# Altium footprint library Miscellaneous Connectors.PcbLib: 245 footprints (part 10 of 16)
Each footprint in its own frame and in the unit in brackets; x right, y up, seen from the top. Pads: shape width x height; smd on the part's side, far side on the other; paste and mask are expansions set on the pad; w line width, h text height; cw(c..) or ccw(c..) is an arc to the next point about the centre after c.
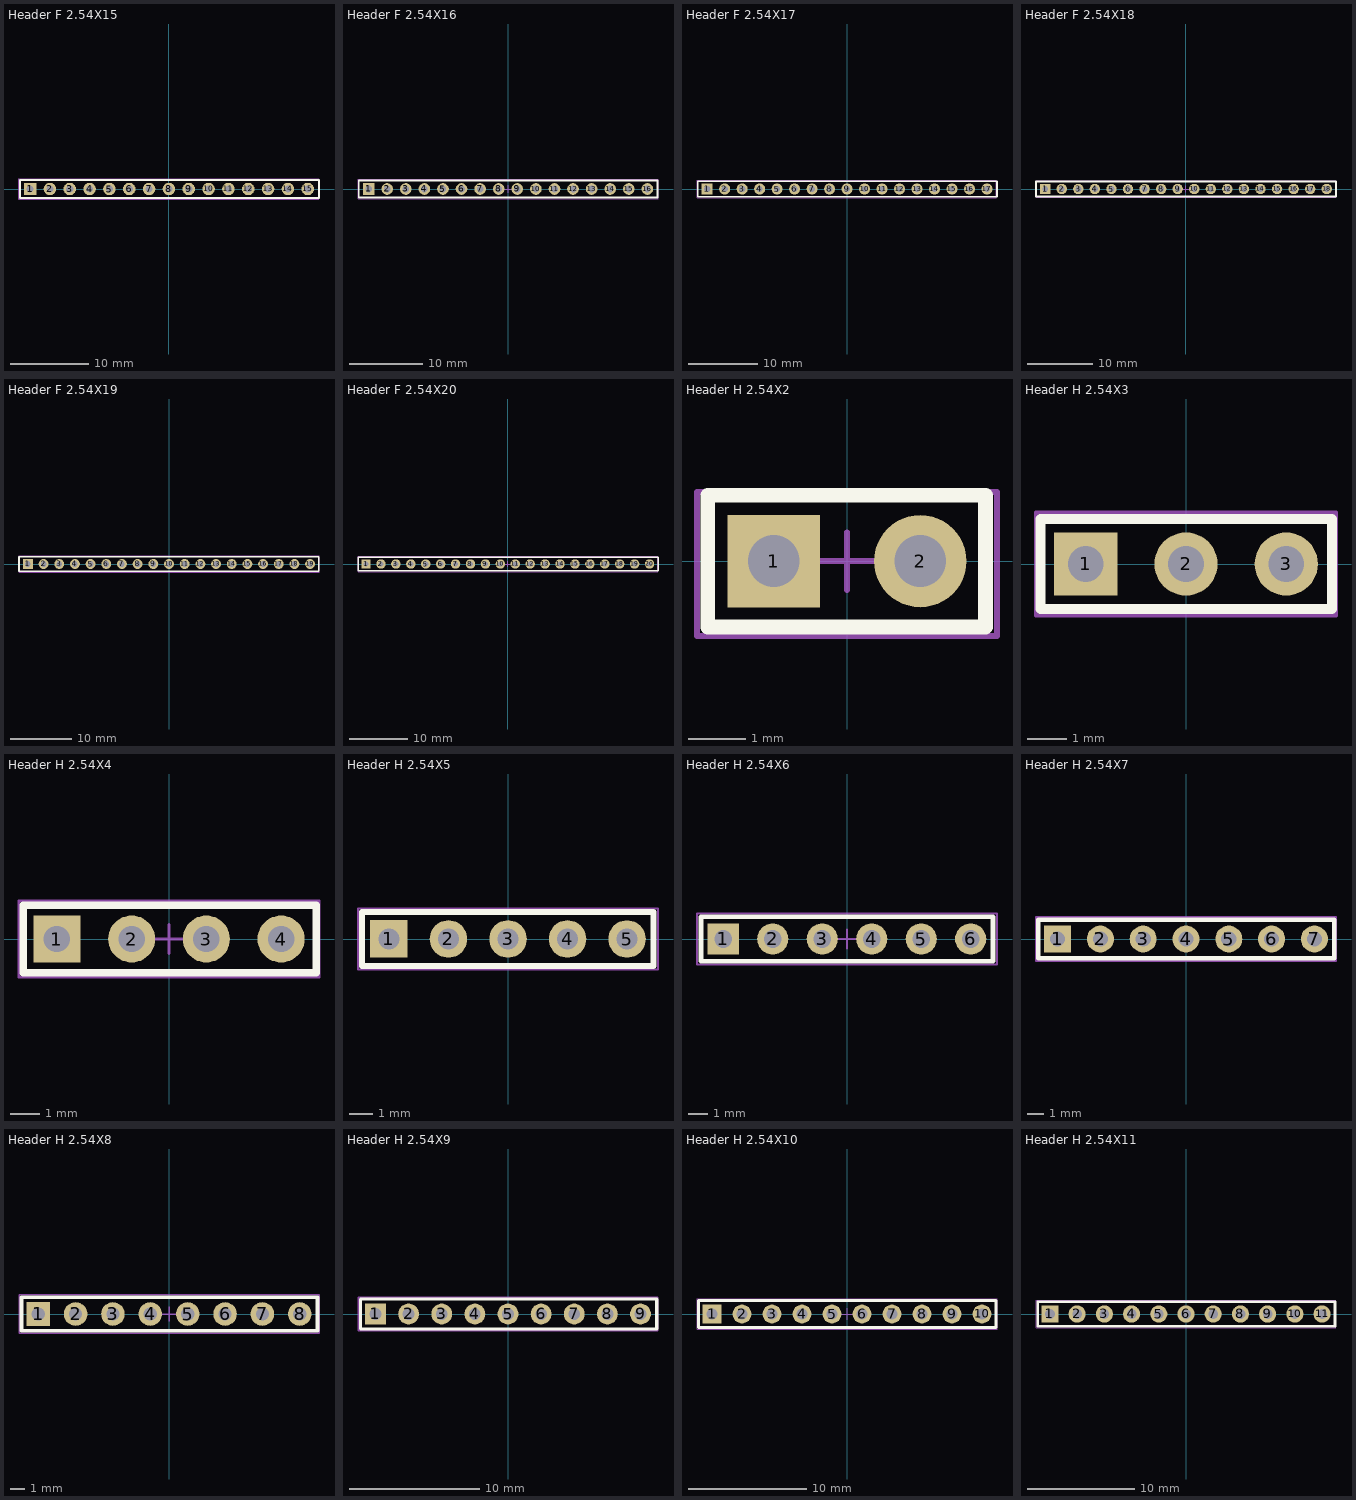
[diagram p9: the footprints below, top view; thin cyan lines are the x and y axes]

## Header F 2.54X15 [mm]
pads (15):
  rect 1.6x1.6 hole 0.9: 1(-17.78,0)
  round 1.6 hole 0.9: 2(-15.24,0) 3(-12.7,0) 4(-10.16,0) 5(-7.62,0) 6(-5.08,0) 7(-2.54,0) 8(0,0) 9(2.54,0) 10(5.08,0) 11(7.62,0) 12(10.16,0) 13(12.7,0) 14(15.24,0) 15(17.78,0)
Top Overlay:
  lines w0.254: -19.1,-1.143 -19.1,1.143 19.22,1.143 19.22,-1.143 -19.1,-1.143
Mechanical 15:
  lines w0.1: -19.2,-1.3 -19.2,1.3 19.2,1.3 19.2,-1.3 -19.2,-1.3
3D body: height 8.6, standoff -3.1, extent -19.175,-1.26 19.175,1.24

## Header F 2.54X16 [mm]
pads (16):
  rect 1.6x1.6 hole 0.9: 1(-19.05,0)
  round 1.6 hole 0.9: 2(-16.51,0) 3(-13.97,0) 4(-11.43,0) 5(-8.89,0) 6(-6.35,0) 7(-3.81,0) 8(-1.27,0) 9(1.27,0) 10(3.81,0) 11(6.35,0) 12(8.89,0) 13(11.43,0) 14(13.97,0) 15(16.51,0) 16(19.05,0)
Top Overlay:
  lines w0.254: -20.4,-1.143 20.45,-1.143 20.45,1.143 -20.4,1.143 -20.4,-1.143
Mechanical 15:
  lines w0.1: -0.5,0 0.5,0 ; 0,-0.5 0,0.5 ; -20.5,-1.3 20.5,-1.3 20.5,1.3 -20.5,1.3 -20.5,-1.3
3D body: height 8.6, standoff -3.1, extent -20.445,-1.25 20.445,1.25

## Header F 2.54X17 [mm]
pads (17):
  rect 1.6x1.6 hole 0.9: 1(-20.32,0)
  round 1.6 hole 0.9: 2(-17.78,0) 3(-15.24,0) 4(-12.7,0) 5(-10.16,0) 6(-7.62,0) 7(-5.08,0) 8(-2.54,0) 9(0,0) 10(2.54,0) 11(5.08,0) 12(7.62,0) 13(10.16,0) 14(12.7,0) 15(15.24,0) 16(17.78,0) 17(20.32,0)
Top Overlay:
  lines w0.254: -21.7,-1.143 -21.7,1.143 21.78,1.143 21.78,-1.143 -21.7,-1.143
Mechanical 15:
  lines w0.1: -21.8,-1.3 -21.8,1.3 21.7,1.3 21.7,-1.3 -21.8,-1.3
3D body: height 8.6, standoff -3.1, extent -21.715,-1.26 21.715,1.24

## Header F 2.54X18 [mm]
pads (18):
  rect 1.6x1.6 hole 0.9: 1(-21.59,0)
  round 1.6 hole 0.9: 2(-19.05,0) 3(-16.51,0) 4(-13.97,0) 5(-11.43,0) 6(-8.89,0) 7(-6.35,0) 8(-3.81,0) 9(-1.27,0) 10(1.27,0) 11(3.81,0) 12(6.35,0) 13(8.89,0) 14(11.43,0) 15(13.97,0) 16(16.51,0) 17(19.05,0) 18(21.59,0)
Top Overlay:
  lines w0.254: -23,-1.143 23.01,-1.143 23.01,1.143 -23,1.143 -23,-1.143
Mechanical 15:
  lines w0.1: -0.5,0 0.5,0 ; 0,-0.5 0,0.5 ; -23,-1.3 23,-1.3 23,1.3 -23,1.3 -23,-1.3
3D body: height 8.6, standoff -3.1, extent -22.98,-1.25 22.99,1.25

## Header F 2.54X19 [mm]
pads (19):
  rect 1.6x1.6 hole 0.9: 1(-22.86,0)
  round 1.6 hole 0.9: 2(-20.32,0) 3(-17.78,0) 4(-15.24,0) 5(-12.7,0) 6(-10.16,0) 7(-7.62,0) 8(-5.08,0) 9(-2.54,0) 10(0,0) 11(2.54,0) 12(5.08,0) 13(7.62,0) 14(10.16,0) 15(12.7,0) 16(15.24,0) 17(17.78,0) 18(20.32,0) 19(22.86,0)
Top Overlay:
  lines w0.254: -24.3,-1.143 -24.3,1.143 24.24,1.143 24.24,-1.143 -24.3,-1.143
Mechanical 15:
  lines w0.1: -24.3,-1.3 -24.3,1.3 24.3,1.3 24.3,-1.3 -24.3,-1.3
3D body: height 8.6, standoff -3.1, extent -24.26,-1.25 24.25,1.25

## Header F 2.54X20 [mm]
pads (20):
  rect 1.6x1.6 hole 0.9: 1(-24.13,0)
  round 1.6 hole 0.9: 2(-21.59,0) 3(-19.05,0) 4(-16.51,0) 5(-13.97,0) 6(-11.43,0) 7(-8.89,0) 8(-6.35,0) 9(-3.81,0) 10(-1.27,0) 11(1.27,0) 12(3.81,0) 13(6.35,0) 14(8.89,0) 15(11.43,0) 16(13.97,0) 17(16.51,0) 18(19.05,0) 19(21.59,0) 20(24.13,0)
Top Overlay:
  lines w0.254: -25.5,-1.143 -25.5,1.143 25.57,1.143 25.57,-1.143 -25.5,-1.143
Mechanical 15:
  lines w0.1: -0.5,0 0.5,0 ; 0,-0.5 0,0.5 ; -25.5,-1.3 -25.5,1.3 25.5,1.3 25.5,-1.3 -25.5,-1.3
3D body: height 8.6, standoff -3.1, extent -25.53,-1.26 25.52,1.24

## Header H 2.54X2 [mm]
pads (2):
  rect 1.6x1.6 hole 0.9: 1(-1.27,0)
  round 1.6 hole 0.9: 2(1.27,0)
Top Overlay:
  lines w0.254: -2.413,-1.143 -2.413,1.143 2.4,1.143 2.4,-1.143 -2.413,-1.143
Mechanical 15:
  lines w0.1: -0.5,0 0.5,0 ; 0,-0.5 0,0.5 ; -2.6,-1.3 -2.6,1.2 2.6,1.2 2.6,-1.3 -2.6,-1.3
3D body: height 4.43, standoff -2.9, extent -2.54,-1.27 2.54,7

## Header H 2.54X3 [mm]
pads (3):
  rect 1.6x1.6 hole 0.9: 1(-2.54,0)
  round 1.6 hole 0.9: 2(0,0) 3(2.54,0)
Top Overlay:
  lines w0.254: -3.683,-1.143 3.7,-1.143 3.7,1.143 -3.683,1.143 -3.683,-1.143
Mechanical 15:
  lines w0.1: -3.8,-1.3 3.8,-1.3 3.8,1.3 -3.8,1.3 -3.8,-1.3
3D body: height 4.43, standoff -2.9, extent -3.81,-1.26 3.81,7.01

## Header H 2.54X4 [mm]
pads (4):
  rect 1.6x1.6 hole 0.9: 1(-3.81,0)
  round 1.6 hole 0.9: 2(-1.27,0) 3(1.27,0) 4(3.81,0)
Top Overlay:
  lines w0.254: -4.953,-1.143 5,-1.143 5,1.143 -4.953,1.143 -4.953,-1.143
Mechanical 15:
  lines w0.1: -0.5,0 0.5,0 ; 0,-0.5 0,0.5 ; -5.1,-1.3 5.1,-1.3 5.1,1.3 -5.1,1.3 -5.1,-1.3
3D body: height 4.43, standoff -2.9, extent -5.08,-1.27 5.08,7

## Header H 2.54X5 [mm]
pads (5):
  rect 1.6x1.6 hole 0.9: 1(-5.08,0)
  round 1.6 hole 0.9: 2(-2.54,0) 3(0,0) 4(2.54,0) 5(5.08,0)
Top Overlay:
  lines w0.254: -6.223,-1.143 6.2,-1.143 6.2,1.143 -6.223,1.143 -6.223,-1.143
Mechanical 15:
  lines w0.1: -6.4,-1.3 6.4,-1.3 6.4,1.3 -6.4,1.3 -6.4,-1.3
3D body: height 4.43, standoff -2.9, extent -6.35,-1.26 6.35,7.01

## Header H 2.54X6 [mm]
pads (6):
  rect 1.6x1.6 hole 0.9: 1(-6.35,0)
  round 1.6 hole 0.9: 2(-3.81,0) 3(-1.27,0) 4(1.27,0) 5(3.81,0) 6(6.35,0)
Top Overlay:
  lines w0.254: -7.493,-1.143 7.5,-1.143 7.5,1.143 -7.493,1.143 -7.493,-1.143
Mechanical 15:
  lines w0.1: -0.5,0 0.5,0 ; 0,-0.5 0,0.5 ; -7.7,-1.3 7.7,-1.3 7.7,1.3 -7.7,1.3 -7.7,-1.3
3D body: height 4.43, standoff -2.9, extent -7.62,-1.27 7.62,7

## Header H 2.54X7 [mm]
pads (7):
  rect 1.6x1.6 hole 0.9: 1(-7.62,0)
  round 1.6 hole 0.9: 2(-5.08,0) 3(-2.54,0) 4(0,0) 5(2.54,0) 6(5.08,0) 7(7.62,0)
Top Overlay:
  lines w0.254: -8.763,-1.143 8.8,-1.143 8.8,1.143 -8.763,1.143 -8.763,-1.143
Mechanical 15:
  lines w0.1: -8.9,-1.3 8.9,-1.3 8.9,1.3 -8.9,1.3 -8.9,-1.3
3D body: height 4.43, standoff -2.9, extent -8.89,-1.26 8.89,7.01

## Header H 2.54X8 [mm]
pads (8):
  rect 1.6x1.6 hole 0.9: 1(-8.89,0)
  round 1.6 hole 0.9: 2(-6.35,0) 3(-3.81,0) 4(-1.27,0) 5(1.27,0) 6(3.81,0) 7(6.35,0) 8(8.89,0)
Top Overlay:
  lines w0.254: -10.033,-1.143 -10.033,1.143 10.1,1.143 10.1,-1.143 -10.033,-1.143
Mechanical 15:
  lines w0.1: -0.5,0 0.5,0 ; 0,-0.5 0,0.5 ; -10.2,-1.3 -10.2,1.3 10.2,1.3 10.2,-1.3 -10.2,-1.3
3D body: height 4.43, standoff -2.9, extent -10.16,-1.26 10.16,7.01

## Header H 2.54X9 [mm]
pads (9):
  rect 1.6x1.6 hole 0.9: 1(-10.16,0)
  round 1.6 hole 0.9: 2(-7.62,0) 3(-5.08,0) 4(-2.54,0) 5(0,0) 6(2.54,0) 7(5.08,0) 8(7.62,0) 9(10.16,0)
Top Overlay:
  lines w0.254: -11.303,-1.143 -11.303,1.143 11.4,1.143 11.4,-1.143 -11.303,-1.143
Mechanical 15:
  lines w0.1: -11.5,-1.3 -11.5,1.3 11.5,1.3 11.5,-1.3 -11.5,-1.3
3D body: height 4.43, standoff -2.9, extent -11.43,-1.27 11.43,7

## Header H 2.54X10 [mm]
pads (10):
  rect 1.6x1.6 hole 0.9: 1(-11.43,0)
  round 1.6 hole 0.9: 2(-8.89,0) 3(-6.35,0) 4(-3.81,0) 5(-1.27,0) 6(1.27,0) 7(3.81,0) 8(6.35,0) 9(8.89,0) 10(11.43,0)
Top Overlay:
  lines w0.254: -12.573,-1.143 12.6,-1.143 12.6,1.143 -12.573,1.143 -12.573,-1.143
Mechanical 15:
  lines w0.1: -0.5,0 0.5,0 ; 0,-0.5 0,0.5 ; -12.7,-1.3 12.7,-1.3 12.7,1.3 -12.7,1.3 -12.7,-1.3
3D body: height 4.43, standoff -2.9, extent -12.7,-1.27 12.7,7

## Header H 2.54X11 [mm]
pads (11):
  rect 1.6x1.6 hole 0.9: 1(-12.7,0)
  round 1.6 hole 0.9: 2(-10.16,0) 3(-7.62,0) 4(-5.08,0) 5(-2.54,0) 6(0,0) 7(2.54,0) 8(5.08,0) 9(7.62,0) 10(10.16,0) 11(12.7,0)
Top Overlay:
  lines w0.254: -13.843,-1.143 -13.843,1.143 13.9,1.143 13.9,-1.143 -13.843,-1.143
Mechanical 15:
  lines w0.1: -14,-1.3 -14,1.3 14,1.3 14,-1.3 -14,-1.3
3D body: height 4.43, standoff -2.9, extent -13.97,-1.27 13.97,7